# Altium footprint library Amin-Library.PcbLib: 601 footprints (part 14 of 38)
Each footprint in its own frame and in the unit in brackets; x right, y up, seen from the top. Pads: shape width x height; smd on the part's side, far side on the other; paste and mask are expansions set on the pad; w line width, h text height; cw(c..) or ccw(c..) is an arc to the next point about the centre after c.
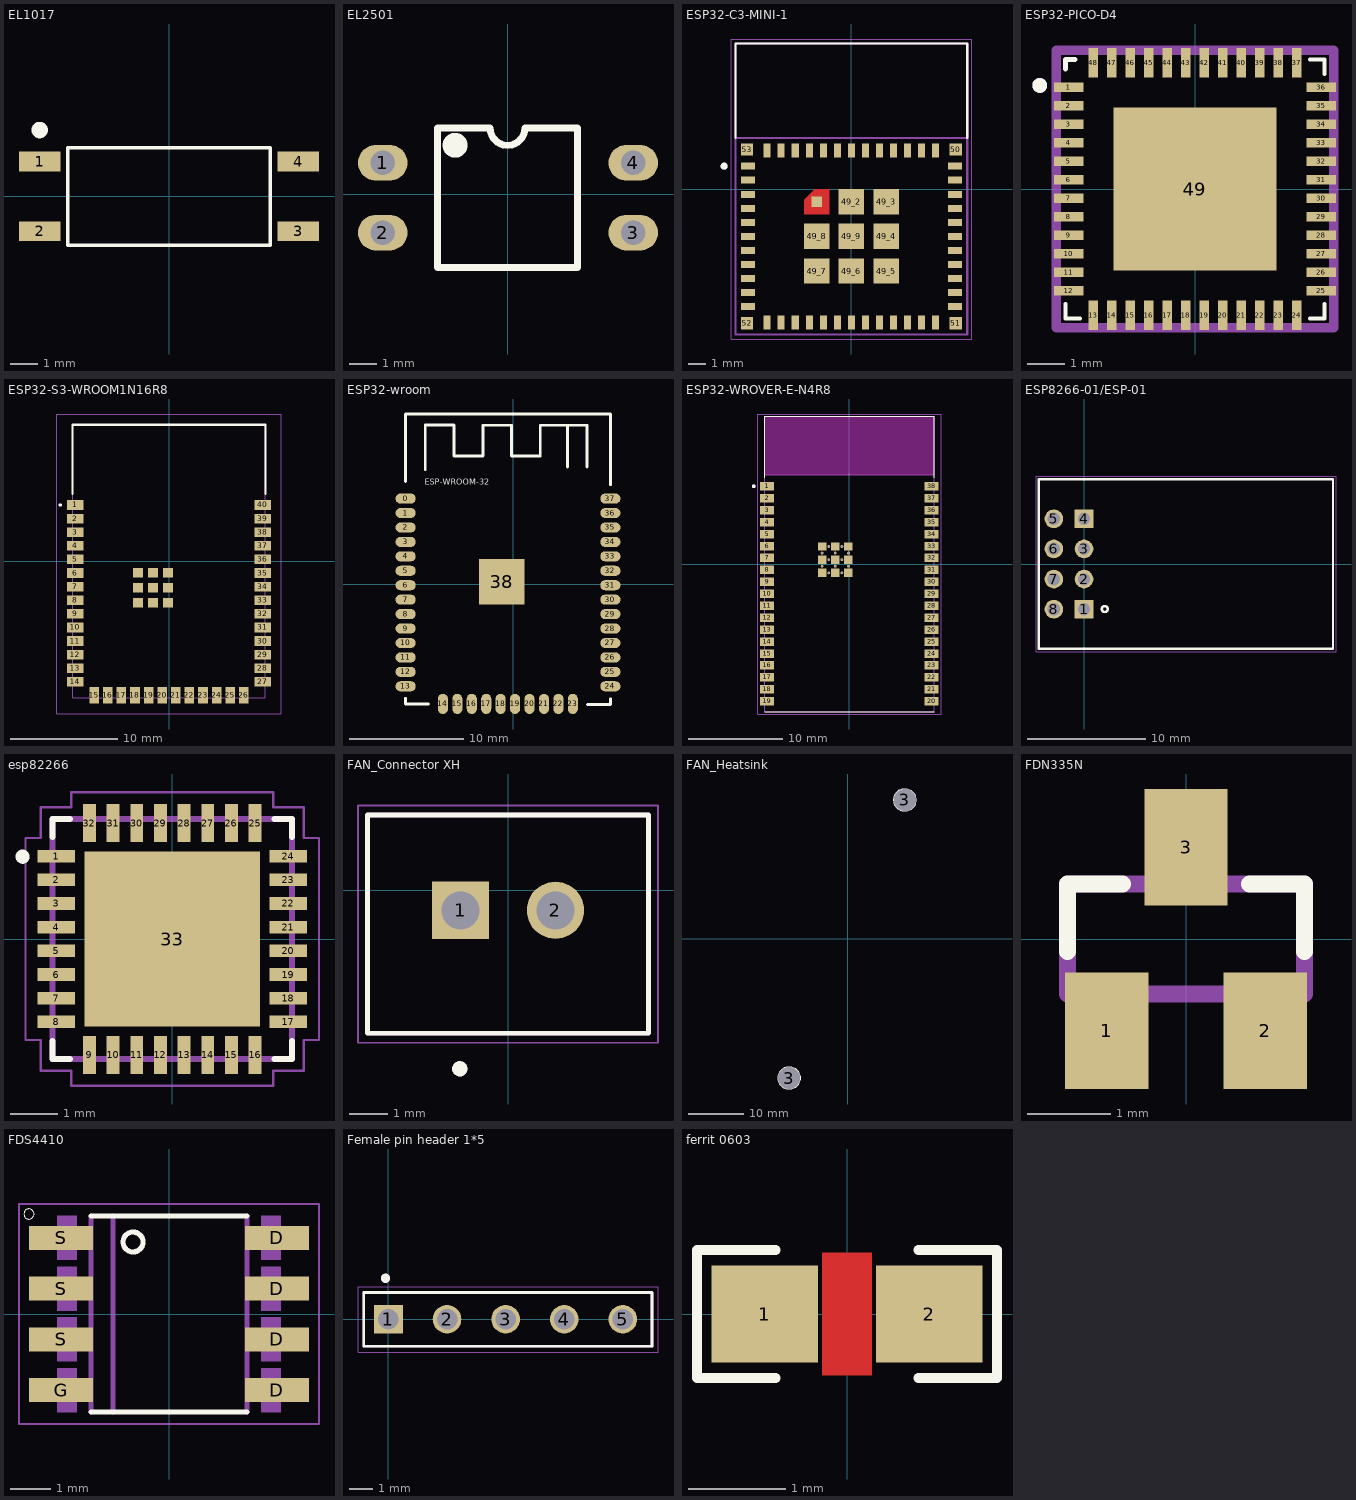
[diagram p13: the footprints below, top view; thin cyan lines are the x and y axes]

## EL1017 [mm] "SOP-4-P2.54-Long"
pads (4):
  rect 1.5x0.711 smd: 1(-4.7,1.27) 2(-4.7,-1.27) 3(4.7,-1.27) 4(4.7,1.27)
Top Overlay:
  circle w0.3: c-4.699,2.413 r0.15
  lines w0.127: -3.683,-1.778 3.683,-1.778 3.683,1.778 -3.683,1.778 -3.683,-1.778
3D body "SOP-4-2.54-Long.STEP": height 1.93, standoff -0.01, extent -5.1,-1.8 5.1,1.8

## EL2501 [mm] "4 PIN DIP PHOTOTRANSISTOR  PHOTOCOUPLER  DIP-4"
pads (4):
  oval 1.8x1.3 hole 0.9: 1(-4.532,1.143) 2(-4.532,-1.397) 3(4.568,-1.397) 4(4.568,1.143)
Top Overlay:
  circle w0.5: c-1.905,1.778 r0.2
  lines w0.254: -2.54,-2.667 -2.54,2.413 -0.635,2.413 ccw(c0,2.413) 0.635,2.413 2.54,2.413 2.54,-2.667 -2.54,-2.667
3D body "User Library-DIP-4.step": height 3.51, standoff -3.79, extent -3.935,-2.421 3.935,2.159

## ESP32-C3-MINI-1 [mm]
height 2.55
pads (61):
  rect 0.8x0.4 smd: 1(-5.9,1.3) 2(-5.9,0.5) 3(-5.9,-0.3) 4(-5.9,-1.1) 5(-5.9,-1.9) 6(-5.9,-2.7) 7(-5.9,-3.5) 8(-5.9,-4.3) 9(-5.9,-5.1) 10(-5.9,-5.9) 11(-5.9,-6.7) 25(5.9,-6.7) 26(5.9,-5.9) 27(5.9,-5.1) 28(5.9,-4.3) 29(5.9,-3.5) 30(5.9,-2.7) 31(5.9,-1.9) 32(5.9,-1.1) 33(5.9,-0.3) 34(5.9,0.5) 35(5.9,1.3)
  rect 0.4x0.8 smd: 12(-4.8,-7.6) 13(-4,-7.6) 14(-3.2,-7.6) 15(-2.4,-7.6) 16(-1.6,-7.6) 17(-0.8,-7.6) 18(0,-7.6) 19(0.8,-7.6) 20(1.6,-7.6) 21(2.4,-7.6) 22(3.2,-7.6) 23(4,-7.6) 24(4.8,-7.6) 36(4.8,2.2) 37(4,2.2) 38(3.2,2.2) 39(2.4,2.2) 40(1.6,2.2) 41(0.8,2.2) 42(0,2.2) 43(-0.8,2.2) 44(-1.6,2.2) 45(-2.4,2.2) 46(-3.2,2.2) 47(-4,2.2) 48(-4.8,2.2)
  rect 0.6x0.6 smd paste-1 mask+0: 49_1(-1.975,-0.725)
  rect 1.45x1.45 smd: 49_2(0,-0.725) 49_3(1.975,-0.725) 49_4(1.975,-2.7) 49_5(1.975,-4.675) 49_6(0,-4.675) 49_7(-1.975,-4.675) 49_8(-1.975,-2.7) 49_9(0,-2.7)
  rect 0.7x0.7 smd: 50(5.95,2.25) 51(5.95,-7.65) 52(-5.95,-7.65) 53(-5.95,2.25)
Top Layer:
  region: -1.25,-1.45 -2.7,-1.45 -2.7,-0.6 -2.1,0 -1.25,0
Top Overlay:
  circle w0.2: c-7.25,1.3 r0.1
  lines w0.127: -6.6,2.92 -6.6,8.3 6.6,8.3 6.6,2.92
Top Paste:
  region: -1.25,-1.45 -2.7,-1.45 -2.7,-0.6 -2.1,0 -1.25,0
Top Solder:
  region: -1.15,-1.55 -2.8,-1.55 -2.8,-0.56 -2.14,0.1 -1.15,0.1
Mechanical 13:
  circle w0.2: c-7.25,1.3 r0.1
  lines w0.127: -6.6,2.9 -6.6,-8.3 6.6,-8.3 6.6,2.9 ; -6.6,2.9 -6.6,8.3 6.6,8.3 6.6,2.9 ; -6.6,2.9 6.6,2.9
Mechanical 15:
  lines w0.05: -6.85,-8.55 -6.85,8.55 6.85,8.55 6.85,-8.55 -6.85,-8.55
3D body "ESP32-C3-MINI-1-N4--3DModel-STEP-418109.STEP": height 2.55, standoff 0, extent -6.6,-8.3 6.6,8.3

## ESP32-PICO-D4 [mm]
pads (49):
  rect 0.8x0.25 smd paste-0.8: 1(-3.413,2.75) 2(-3.413,2.25) 3(-3.413,1.75) 4(-3.413,1.25) 5(-3.413,0.75) 6(-3.413,0.25) 7(-3.413,-0.25) 8(-3.413,-0.75) 9(-3.413,-1.25) 10(-3.413,-1.75) 11(-3.413,-2.25) 12(-3.413,-2.75) 25(3.413,-2.75) 26(3.413,-2.25) 27(3.413,-1.75) 28(3.413,-1.25) 29(3.413,-0.75) 30(3.413,-0.25) 31(3.413,0.25) 32(3.413,0.75) 33(3.413,1.25) 34(3.413,1.75) 35(3.413,2.25)
  rect 0.25x0.8 smd paste-0.8: 13(-2.75,-3.413) 14(-2.25,-3.413) 15(-1.75,-3.413) 16(-1.25,-3.413) 17(-0.75,-3.413) 18(-0.25,-3.413) 19(0.25,-3.413) 20(0.75,-3.413) 21(1.25,-3.413) 22(1.75,-3.413) 23(2.25,-3.413) 24(2.75,-3.413) 37(2.75,3.413) 38(2.25,3.413) 39(1.75,3.413) 40(1.25,3.413) 41(0.75,3.413) 42(0.25,3.413) 43(-0.25,3.413) 44(-0.75,3.413) 45(-1.25,3.413) 46(-1.75,3.413) 47(-2.25,3.413) 48(-2.75,3.413)
  rect 0.8x0.25 smd paste-0.2: 36(3.413,2.75)
  rect 4.4x4.4 smd paste-1.5: 49(0,0)
Top Overlay:
  circle w0.2: c-4.2,2.8 r0.1
  lines w0.1: -3.5,-3.1 -3.5,-3.5 -3.1,-3.5 ; 3.1,-3.5 3.5,-3.5 3.5,-3.1 ; 3.1,3.5 3.5,3.5 3.5,3.1
  lines w0.127: -3.5,3.245 -3.5,3.5 -3.245,3.5
Top Paste:
  rectangle: -3.663,1.625 -3.163,1.875
  rectangle: 3.163,2.625 3.663,2.875
  region: -2.125,3.188 -2.125,3.688 -2.375,3.688 -2.375,3.188
  region: -2.625,3.188 -2.625,3.688 -2.875,3.688 -2.875,3.188
  region: 2.875,3.188 2.875,3.688 2.625,3.688 2.625,3.188
  region: 2.375,3.188 2.375,3.688 2.125,3.688 2.125,3.188
  region: 1.875,3.188 1.875,3.688 1.625,3.688 1.625,3.188
  region: 1.375,3.188 1.375,3.688 1.125,3.688 1.125,3.188
  region: 0.875,3.188 0.875,3.688 0.625,3.688 0.625,3.188
  region: 0.375,3.188 0.375,3.688 0.125,3.688 0.125,3.188
  region: -0.125,3.188 -0.125,3.688 -0.375,3.688 -0.375,3.188
  region: -0.625,3.188 -0.625,3.688 -0.875,3.688 -0.875,3.188
  region: -1.125,3.188 -1.125,3.688 -1.375,3.688 -1.375,3.188
  region: -1.625,3.188 -1.625,3.688 -1.875,3.688 -1.875,3.188
  region: -2.125,-3.638 -2.125,-3.138 -2.375,-3.138 -2.375,-3.638
  region: -2.625,-3.638 -2.625,-3.138 -2.875,-3.138 -2.875,-3.638
  region: 2.875,-3.638 2.875,-3.138 2.625,-3.138 2.625,-3.638
  region: 2.375,-3.638 2.375,-3.138 2.125,-3.138 2.125,-3.638
  region: 1.875,-3.638 1.875,-3.138 1.625,-3.138 1.625,-3.638
  region: 1.375,-3.638 1.375,-3.138 1.125,-3.138 1.125,-3.638
  region: 0.875,-3.638 0.875,-3.138 0.625,-3.138 0.625,-3.638
  region: 0.375,-3.638 0.375,-3.138 0.125,-3.138 0.125,-3.638
  region: -0.125,-3.638 -0.125,-3.138 -0.375,-3.138 -0.375,-3.638
  region: -0.625,-3.638 -0.625,-3.138 -0.875,-3.138 -0.875,-3.638
  region: -1.125,-3.638 -1.125,-3.138 -1.375,-3.138 -1.375,-3.638
  region: -1.625,-3.638 -1.625,-3.138 -1.875,-3.138 -1.875,-3.638
  rectangle: -3.663,2.125 -3.163,2.375
  rectangle: -3.663,2.625 -3.163,2.875
  rectangle: -3.663,-2.875 -3.163,-2.625
  rectangle: -3.663,-2.375 -3.163,-2.125
  rectangle: -3.663,-1.875 -3.163,-1.625
  rectangle: -3.663,-1.375 -3.163,-1.125
  rectangle: -3.663,-0.875 -3.163,-0.625
  rectangle: -3.663,-0.375 -3.163,-0.125
  rectangle: -3.663,0.125 -3.163,0.375
  rectangle: -3.663,0.625 -3.163,0.875
  rectangle: -3.663,1.125 -3.163,1.375
  rectangle: 3.163,2.125 3.663,2.375
  rectangle: 3.163,-2.875 3.663,-2.625
  rectangle: 3.163,-2.375 3.663,-2.125
  rectangle: 3.163,-1.875 3.663,-1.625
  rectangle: 3.163,-1.375 3.663,-1.125
  rectangle: 3.163,-0.875 3.663,-0.625
  rectangle: 3.163,-0.375 3.663,-0.125
  rectangle: 3.163,0.125 3.663,0.375
  rectangle: 3.163,0.625 3.663,0.875
  rectangle: 3.163,1.125 3.663,1.375
  rectangle: 3.163,1.625 3.663,1.875
  region: 0.934,-0.894 2.1,-0.894 2.1,-1.75 0.934,-1.75
  region: 0.934,0.656 2.1,0.656 2.1,-0.7 0.934,-0.7
  region: 0.934,1.75 2.1,1.75 2.1,0.878 0.934,0.878
  region: -2.1,-0.894 -0.934,-0.894 -0.934,-1.75 -2.1,-1.75
  region: -0.7,-0.894 0.616,-0.894 0.616,-1.75 -0.7,-1.75
  region: -2.1,0.656 -0.934,0.656 -0.934,-0.7 -2.1,-0.7
  region: -2.1,1.75 -0.934,1.75 -0.934,0.878 -2.1,0.878
  region: -0.7,1.75 0.616,1.75 0.616,0.878 -0.7,0.878
Top Courtyard:
  lines w0.254: -3.75,-3.75 -3.75,3.75 3.75,3.75 3.75,-3.75 -3.75,-3.75
Mechanical 13:
  circle w0.2: c-4.2,2.8 r0.1
Mechanical 15:
  lines w0.05: -3.75,-3.75 3.75,-3.75 3.75,3.75 -3.75,3.75 -3.75,-3.75
3D body "step_temp.STEP": height 1.04, standoff 0, extent -3.5,-3.5 3.5,3.5

## ESP32-S3-WROOM1N16R8 [mm]
pads (49):
  rect 1.5x0.9 smd: 1(-8.75,5.26) 2(-8.75,3.99) 3(-8.75,2.72) 4(-8.75,1.45) 5(-8.75,0.18) 6(-8.75,-1.09) 7(-8.75,-2.36) 8(-8.75,-3.63) 9(-8.75,-4.9) 10(-8.75,-6.17) 11(-8.75,-7.44) 12(-8.75,-8.71) 13(-8.75,-9.98) 14(-8.75,-11.25) 27(8.75,-11.25) 28(8.75,-9.98) 29(8.75,-8.71) 30(8.75,-7.44) 31(8.75,-6.17) 32(8.75,-4.9) 33(8.75,-3.63) 34(8.75,-2.36) 35(8.75,-1.09) 36(8.75,0.18) 37(8.75,1.45) 38(8.75,2.72) 39(8.75,3.99) 40(8.75,5.26)
  rect 0.9x1.5 smd: 15(-6.985,-12.5) 16(-5.715,-12.5) 17(-4.445,-12.5) 18(-3.175,-12.5) 19(-1.905,-12.5) 20(-0.635,-12.5) 21(0.635,-12.5) 22(1.905,-12.5) 23(3.175,-12.5) 24(4.445,-12.5) 25(5.715,-12.5) 26(6.985,-12.5)
  rect 0.9x0.9 smd: EPAD(-2.9,-3.86) EPAD(-2.9,-2.46) EPAD(-2.9,-1.06) EPAD(-1.5,-3.86) EPAD(-1.5,-2.46) EPAD(-1.5,-1.06) EPAD(-0.1,-3.86) EPAD(-0.1,-2.46) EPAD(-0.1,-1.06)
Top Overlay:
  lines w0.2: -9,6.3 -9,12.75 9,12.75 9,6.3 ; -10.2,5.26 ccw(c-10.15,5.26) -10.1,5.26 ; -10.2,5.26 cw(c-10.15,5.26) -10.1,5.26 ; -10.2,5.26 ccw(c-10.15,5.26) -10.1,5.26
Mechanical 15:
  lines w0.1: -9,-12.75 -9,12.75 9,12.75 9,-12.75 -9,-12.75
Mechanical 20:
  lines w0.1: -10.5,-14.25 -10.5,13.75 10.5,13.75 10.5,-14.25 -10.5,-14.25
3D body "ESP32-S3-WROOM-1 3D Model.STEP": height 3.1, standoff 0, extent -9,-12.75 9,12.75

## ESP32-wroom [mil]
pads (39):
  oval 70x35 smd: 0(-372,296) 1(-372,246) 2(-372,196) 3(-372,146) 4(-372,96) 5(-372,46) 6(-372,-4) 7(-372,-54) 8(-372,-104) 9(-372,-154) 10(-372,-204) 11(-372,-254) 12(-372,-304) 13(-372,-354) 24(337,-354) 25(337,-304) 26(337,-254) 27(337,-204) 28(337,-154) 29(337,-104) 30(337,-54) 31(337,-4) 32(337,46) 33(337,96) 34(337,146) 35(337,196) 36(337,246) 37(337,296)
  oval 35x70 smd: 14(-243,-415) 15(-193,-415) 16(-143,-415) 17(-93,-415) 18(-43,-415) 19(7,-415) 20(57,-415) 21(107,-415) 22(157,-415) 23(207,-415)
  rect 157.5x157.5 smd: 38(-39.37,7.87)
Top Overlay:
  lines w10: -372,-395.31 -372,-415 -293.26,-415 ; -372,355 -372,586.85 ; -372,589 337,589 337,344 ; -304,396 -304,551 -204,551 -204,443 -104,443 -104,550 -5,550 -5,443 94,443 94,550 256,550 256,405 ; 188,405 188,550 ; 258.26,-416.97 337,-416.97 337,-397.28
  text "ESP-WROOM-32" at -306,344 h20
3D body "ESP32-WROOM-32D--3DModel-STEP-56544.STEP": height 128.46, standoff 0.5, extent -371.66,-416.97 337,586.97

## ESP32-WROVER-E [mm]

## ESP32-WROVER-E-N4R8 [mm]
height 3.45
pads (59):
  rect 1.5x0.9 smd: 1(-8.75,8.26) 2(-8.75,6.99) 3(-8.75,5.72) 4(-8.75,4.45) 5(-8.75,3.18) 6(-8.75,1.91) 7(-8.75,0.64) 8(-8.75,-0.63) 9(-8.75,-1.9) 10(-8.75,-3.17) 11(-8.75,-4.44) 12(-8.75,-5.71) 13(-8.75,-6.98) 14(-8.75,-8.25) 15(-8.75,-9.52) 16(-8.75,-10.79) 17(-8.75,-12.06) 18(-8.75,-13.33) 19(-8.75,-14.6) 20(8.75,-14.6) 21(8.75,-13.33) 22(8.75,-12.06) 23(8.75,-10.79) 24(8.75,-9.52) 25(8.75,-8.25) 26(8.75,-6.98) 27(8.75,-5.71) 28(8.75,-4.44) 29(8.75,-3.17) 30(8.75,-1.9) 31(8.75,-0.63) 32(8.75,0.64) 33(8.75,1.91) 34(8.75,3.18) 35(8.75,4.45) 36(8.75,5.72) 37(8.75,6.99) 38(8.75,8.26)
  rect 0.9x0.9 smd: 39_1(-2.9,1.86) 39_2(-1.5,1.86) 39_3(-0.1,1.86) 39_4(-2.9,0.46) 39_5(-1.5,0.46) 39_6(-0.1,0.46) 39_7(-2.9,-0.94) 39_8(-1.5,-0.94) 39_9(-0.1,-0.94)
  round 0.3 hole 0.2 mask+0: 40(-2.2,1.86) 41(-0.8,1.86) 42(-2.9,1.16) 43(-1.5,1.16) 44(-0.1,1.16) 45(-2.2,0.46) 46(-0.8,0.46) 47(-2.9,-0.24) 48(-1.5,-0.24) 49(-0.1,-0.24) 50(-2.2,-0.94) 51(-0.8,-0.94)
Top Overlay:
  circle w0.2: c-10.16,8.26 r0.1
  lines w0.127: -9,-15.7 9,-15.7 ; -9,9.15 -9,15.7 9,15.7 9,9.15
Keep-Out Layer:
  region: 9,9.48 -9,9.48 -9,15.7 9,15.7
Mechanical 13:
  circle w0.2: c-10.16,8.26 r0.1
  lines w0.127: -9,9.48 9,9.48 ; -9,9.48 -9,-15.7 9,-15.7 9,9.48 ; -9,9.48 -9,15.7 9,15.7 9,9.48
Mechanical 15:
  lines w0.05: -9.75,-15.95 -9.75,15.95 9.75,15.95 9.75,-15.95 -9.75,-15.95
3D body "ESP32-WROVER-E (8MB).STEP": height 3.45, standoff 0, extent -9,-15.7 9,15.7

## ESP8266-01/ESP-01 [mm]
pads (8):
  rect 1.575x1.575 hole 1.05: 1(0,-3.81) 4(0,3.81)
  round 1.575 hole 1.05: 2(0,-1.27) 3(0,1.27) 5(-2.54,3.81) 6(-2.54,1.27) 7(-2.54,-1.27) 8(-2.54,-3.81)
Top Overlay:
  circle w0.2: c1.75,-3.8 r0.25
  lines w0.2: -3.81,-7.15 -3.81,7.15 21,7.15 21,-7.15 -3.81,-7.15
Mechanical 15:
  lines w0.05: -4.05,-7.4 -4.05,7.4 21.25,7.4 21.25,-7.4 -4.05,-7.4
3D body "User Library-ESP8266 ESP-01.step": height 5.89, standoff -5.79, extent -3.937,-7.25 20.863,7.25

## esp82266 [mm]
pads (33):
  rect 0.8x0.27 smd: 1(-2.45,1.75) 2(-2.45,1.25) 3(-2.45,0.75) 4(-2.45,0.25) 5(-2.45,-0.25) 6(-2.45,-0.75) 7(-2.45,-1.25) 8(-2.45,-1.75) 17(2.45,-1.75) 18(2.45,-1.25) 19(2.45,-0.75) 20(2.45,-0.25) 21(2.45,0.25) 22(2.45,0.75) 23(2.45,1.25) 24(2.45,1.75)
  rect 0.27x0.8 smd: 9(-1.75,-2.45) 10(-1.25,-2.45) 11(-0.75,-2.45) 12(-0.25,-2.45) 13(0.25,-2.45) 14(0.75,-2.45) 15(1.25,-2.45) 16(1.75,-2.45) 25(1.75,2.45) 26(1.25,2.45) 27(0.75,2.45) 28(0.25,2.45) 29(-0.25,2.45) 30(-0.75,2.45) 31(-1.25,2.45) 32(-1.75,2.45)
  rect 3.7x3.7 smd: 33(0,0)
Top Overlay:
  circle w0.15: c-3.163,1.739 r0.075
  lines w0.127: -2.53,-2.156 -2.53,-2.53 -2.156,-2.53 ; -2.53,2.156 -2.53,2.53 -2.156,2.53 ; 2.156,-2.53 2.53,-2.53 2.53,-2.156 ; 2.156,2.53 2.53,2.53 2.53,2.156
Top Paste:
  region: -1.172,1.17 1.17,1.17 1.17,-1.172 -1.172,-1.172
Mechanical 4:
  lines w0.127: -2.53,-2.53 2.53,-2.53 ; -2.53,-2.53 -2.53,2.53 ; -2.53,-2.53 2.53,-2.53 ; -2.53,-2.53 -2.53,2.53 ; -2.53,2.53 2.53,2.53 ; -2.53,2.53 2.53,2.53 ; 2.53,-2.53 2.53,2.53 ; 2.53,-2.53 2.53,2.53
Mechanical 16:
  lines w0.05: -3.1,-2.135 -3.1,2.135 -2.78,2.135 -2.78,2.78 -2.135,2.78 -2.135,3.1 2.135,3.1 2.135,2.78 2.78,2.78 2.78,2.135 3.1,2.135 3.1,-2.135 2.78,-2.135 2.78,-2.78 2.135,-2.78 2.135,-3.1 -2.135,-3.1 -2.135,-2.78 -2.78,-2.78 -2.78,-2.135 -3.1,-2.135
3D body "User Library-QFN-32UH.step": height 0.75, standoff 0, extent -2.51,-2.51 2.51,2.51

## FAN_Connector XH [mm] "FAN_Connector XH 2.54mm"
pads (2):
  rect 1.508x1.508 hole 1: 1(-1.25,-0.525)
  round 1.508 hole 1: 2(1.25,-0.525)
Top Overlay:
  circle w0.2: c-1.27,-4.699 r0.1
  lines w0.127: -3.7,-3.764 -3.7,1.986 3.7,1.986 3.7,-3.764 -3.7,-3.764
Mechanical 13:
  circle w0.2: c-1.27,-4.699 r0.1
  lines w0.127: -3.7,-3.764 -3.7,1.986 3.7,1.986 3.7,-3.764 -3.7,-3.764
Mechanical 15:
  lines w0.05: -3.95,-4.014 -3.95,2.236 3.95,2.236 3.95,-4.014 -3.95,-4.014
3D body "User Library-CONN, HDR, 2_5mm X 2.step": height 7.12, standoff -3.8, extent -3.708,-3.886 3.683,1.854

## FAN_Heatsink [mm] "55mm Aluminum Heatsink with Cooling Fan"
pads (2):
  round 4 hole 4: 3(-10.668,-25.4) 3(10.414,25.273)
Top Overlay:
  circle w0.254: c-10.668,-25.4 r2
  circle w0.254: c10.414,25.273 r2
3D body "55mm-heatsink.STEP": height 22.15, standoff -0.35, extent -27.504,-28.406 27.496,28.417

## FDN335N [mm]
pads (3):
  rect 1x1.4 smd: 1(-0.95,-1.1) 2(0.95,-1.1) 3(0,1.1)
Top Overlay:
  lines w0.203: -1.422,-0.152 -1.422,0.66 -0.764,0.66 ; 0.764,0.66 1.422,0.66 1.422,-0.152
Mechanical 4:
  region: -0.229,1.295 0.229,1.295 0.229,0.712 -0.229,0.712
  region: 0.712,-0.711 1.168,-0.711 1.168,-1.296 0.712,-1.296
  region: -1.169,-0.711 -0.711,-0.711 -0.711,-1.296 -1.169,-1.296
  region: -0.229,1.295 0.229,1.295 0.229,0.712 -0.229,0.712
  region: 0.712,-0.711 1.168,-0.711 1.168,-1.296 0.712,-1.296
  region: -1.169,-0.711 -0.711,-0.711 -0.711,-1.296 -1.169,-1.296
  lines w0.203: -1.422,-0.66 1.422,-0.66 ; -1.422,-0.66 -1.422,0.66 ; -1.422,-0.66 1.422,-0.66 ; -1.422,-0.66 -1.422,0.66 ; -1.422,0.66 1.422,0.66 ; -1.422,0.66 1.422,0.66 ; 1.422,-0.66 1.422,0.66 ; 1.422,-0.66 1.422,0.66
3D body "CircuitWorks-SOT-23.step": height 1.11, standoff 0.01, extent -1.5,-1.25 1.5,1.25

## FDS4410 [mm]
pads (8):
  rect 1.6x0.6 smd: D(2.7,-1.905) D(2.7,-0.635) D(2.7,0.635) D(2.7,1.905) G(-2.7,-1.905) S(-2.7,-0.635) S(-2.7,0.635) S(-2.7,1.905)
Top Overlay:
  circle w0: c-3.5,2.5 r0.127
  circle w0.127: c-0.9,1.8 r0.25
  lines w0.127: -1.95,-2.45 1.95,-2.45 ; -1.95,2.45 1.95,2.45
Mechanical 4:
  region: -2.8,2.455 -2.305,2.455 -2.305,1.357 -2.8,1.357
  region: -2.797,1.185 -2.305,1.185 -2.305,0.085 -2.797,0.085
  region: -2.796,-0.085 -2.305,-0.085 -2.305,-1.185 -2.796,-1.185
  region: -2.795,-1.355 -2.305,-1.355 -2.305,-2.455 -2.795,-2.455
  region: 2.309,-1.355 2.795,-1.355 2.795,-2.459 2.309,-2.459
  region: 2.308,-0.085 2.795,-0.085 2.795,-1.187 2.308,-1.187
  region: 2.306,1.185 2.795,1.185 2.795,0.085 2.306,0.085
  region: 2.306,2.455 2.795,2.455 2.795,1.355 2.306,1.355
  region: -2.8,2.455 -2.305,2.455 -2.305,1.357 -2.8,1.357
  region: -2.797,1.185 -2.305,1.185 -2.305,0.085 -2.797,0.085
  region: -2.796,-0.085 -2.305,-0.085 -2.305,-1.185 -2.796,-1.185
  region: -2.795,-1.355 -2.305,-1.355 -2.305,-2.455 -2.795,-2.455
  region: 2.309,-1.355 2.795,-1.355 2.795,-2.459 2.309,-2.459
  region: 2.308,-0.085 2.795,-0.085 2.795,-1.187 2.308,-1.187
  region: 2.306,1.185 2.795,1.185 2.795,0.085 2.306,0.085
  region: 2.306,2.455 2.795,2.455 2.795,1.355 2.306,1.355
  lines w0.127: -1.95,-2.45 -1.95,2.45 -1.95,-2.45 ; -1.4,-2.45 -1.4,2.45 -1.4,-2.45 ; 1.95,-2.45 1.95,2.45 1.95,-2.45
Mechanical 16:
  lines w0.05: -3.75,-2.75 3.75,-2.75 3.75,2.75 -3.75,2.75 -3.75,-2.75
3D body "KF33BD.step": height 1.45, standoff 0, extent -2.857,-2.451 2.921,2.451

## Female pin header 1*5 [mm] "2.54MM"
pads (5):
  rect 1.24x1.24 hole 0.89: 1(0,0)
  round 1.24 hole 0.89: 2(2.54,0) 3(5.08,0) 4(7.62,0) 5(10.16,0)
Top Overlay:
  circle w0.2: c-0.127,1.778 r0.1
  lines w0.127: -1.07,-1.17 11.43,-1.17 11.43,1.17 -1.07,1.17 -1.07,-1.17
Mechanical 4:
  circle w0.2: c-0.127,1.778 r0.1
  circle w0.2: c-0.127,1.778 r0.1
  lines w0.127: -1.07,-1.17 11.43,-1.17 ; -1.07,-1.17 11.43,-1.17 ; -1.07,-1.17 -1.07,1.17 ; -1.07,-1.17 11.43,-1.17 ; -1.07,-1.17 11.43,-1.17 ; -1.07,-1.17 -1.07,1.17 ; -1.07,1.17 11.43,1.17 ; -1.07,1.17 11.43,1.17 ; 11.43,-1.17 11.43,1.17 ; 11.43,-1.17 11.43,1.17
Mechanical 16:
  lines w0.05: -1.32,-1.42 -1.32,1.42 11.684,1.42 11.684,-1.42 -1.32,-1.42
3D body "Female 5 Pin Header.step": height 9, standoff -3, extent -1.09,-1.25 11.41,1.25

## ferrit 0603 [mm]
pads (2):
  rect 1.1x1 smd: 1(-0.85,0) 2(0.85,0)
Top Layer:
  pour cut-out: -0.254,-0.635 0.254,-0.635 0.254,0.635 -0.254,0.635
Top Overlay:
  lines w0.1: -0.737,-0.66 -1.549,-0.66 -1.549,0 -1.549,0.66 -0.737,0.66 ; 0.737,-0.66 1.549,-0.66 1.549,0 1.549,0.66 0.737,0.66
3D body "User Library-FB_1608.STEP": height 0.8, standoff 0, extent -0.8,-0.4 0.8,0.4